# Altium schematic symbol library Transistors-Thyristors.SchLib: 9 symbols
Pins are listed as number, name and electrical type; pins without a type are passive.

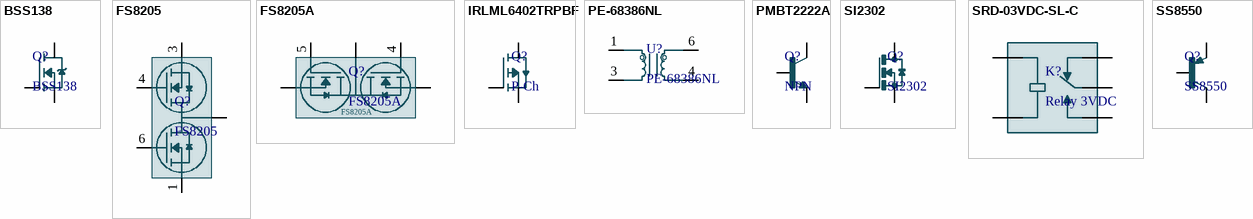
[diagram p0: symbols BSS138 to SS8550]

## BSS138
designator Q?
N-Channel 50 V 220mA (Ta) 350mW (Ta) Surface Mount SOT-23-3; Value: Transistor; MF: onsemi; SnapEDA_Link: https://www.snapeda.com/parts/BSS138/Onsemi/view-part/?ref=snap; Package: SOT-23-3 Motorola; MP: BSS138; Check_prices: https://www.snapeda.com/parts/BSS138/Onsemi/view-part/?ref=eda
footprint BSS138 (SOT95P240X111-3N)
pins: 1 G, 2 S, 3 D

## FS8205
designator Q?
Dual N-Channel Enhancement Mode Power MOSFET; MF: Fortune Semiconductor; SnapEDA_Link: https://www.snapeda.com/parts/FS8205/Fortune+Semiconductor/view-part/?ref=snap; Package: Package; Value: *; MP: FS8205; Check_prices: https://www.snapeda.com/parts/FS8205/Fortune+Semiconductor/view-part/?ref=eda
footprint FS8205 (SOT95P280X145-6N)
pins: 1 S1, 2 D12, 3 S2, 4 G2, 5 D12, 6 G1

## FS8205A
designator Q?
DUAL N-CH MOS 20V 3/3A TSSOP-8; MF: Fortune Semiconductor; SnapEDA_Link: https://www.snapeda.com/parts/FS8205A/Fortune+Semiconductor/view-part/?ref=snap; Package: Package; Value: *; MP: FS8205A; Check_prices: https://www.snapeda.com/parts/FS8205A/Fortune+Semiconductor/view-part/?ref=eda
footprint FS8205A (SOP65P640X120-8N)
pins: 1 D12, 2 S1, 3 S1, 4 G1, 5 G2, 6 S2, 7 S2, 8 D12

## IRLML6402TRPBF
designator Q?, comment P-Ch
P-Channel 20 V 3.7A (Ta) 1.3W /SOT-23; MF: Infineon; MP: IRLML6402TRPBF; SnapEDA_Link: https://www.snapeda.com/parts/IRLML6402TRPBF/Infineon/view-part/?ref=snap; Package: SOT-23-3 ON Semiconductor; Value: *; Check_prices: https://www.snapeda.com/parts/IRLML6402TRPBF/Infineon/view-part/?ref=eda
footprint IRLML6402TRPBF (SOT95P237X112-3N)
pins: 1 G, 2 S, 3 D

## PE-68386NL
designator U?
785µH Pulse Transformer 1:1 Surface Mount; MF: Pulse Electronics; Value: *; Availability: Unavailable; Package: Pulse Electronics; Price: None; SnapEDA_Link: https://www.snapeda.com/parts/PE-68386NL/Pulse%20Electronics%20Power/view-part/455487/?ref=snap; MP: PE-68386NL
pins: 1, 3, 4, 6

## PMBT2222A
designator Q?, comment NPN
Bipolar (BJT) Transistor NPN 40V 600mA 300MHz 250mW Surface Mount SOT23: TO-236AB; MF: Infineon; MP: PMBT2222A; Price: None; Purchase-URL: https://pricing.snapeda.com/search/part/PMBT2222A/?ref=eda; Package: SOT-23-3 Infineon; Check_prices: https://www.snapeda.com/parts/PMBT2222A/Infineon/view-part/?ref=eda; Availability: In Stock; Value: Transistor; SnapEDA_Link: https://www.snapeda.com/parts/PMBT2222A/Infineon/view-part/?ref=snap
footprint PMBT2222A (TO-236AB)
pins: 1 B, 2 E, 3 C

## SI2302
designator Q?
N-Channel 20 V 2.6A (Ta) 710mW (Ta) Surface Mount SOT-23-3 (TO-236); Value: Transistor; MF: Vishay Siliconix; Price: None; Availability: In Stock; Package: SOT-23-3 Vishay Siliconix; MP: SI2302; SnapEDA_Link: https://www.snapeda.com/parts/SI2302/Vishay+Siliconix/view-part/?ref=snap; Purchase-URL: https://pricing.snapeda.com/search/part/SI2302/?ref=eda; Check_prices: https://www.snapeda.com/parts/SI2302/Vishay+Siliconix/view-part/?ref=eda
footprint SI2302 (SOT23)
pins: 1 G, 2 S, 3 D

## SRD-03VDC-SL-C
designator K?, comment Relay 3VDC
Relays General Purpose Non Latching 3VDC SPDT 10A (250VAC) Max 5PIN; MF: Songle Relay; MP: SRD-03VDC-SL-C; SnapEDA_Link: https://www.snapeda.com/parts/SRD-03VDC-SL-C/Songle+Relay/view-part/?ref=snap; Package: NON STANDARD-5 Songle Relay; Value: *; Check_prices: https://www.snapeda.com/parts/SRD-03VDC-SL-C/Songle+Relay/view-part/?ref=eda
footprint RELAY_SRD-03VDC-SL-C
pins: COIL1, COIL2, COM, NC, NO

## SS8550
designator Q?
Bipolar (BJT) Transistor PNP 25 V 1.5 A 100MHz 300 mW Surface Mount SOT-23; MF: MDD; SnapEDA_Link: https://www.snapeda.com/parts/SS8550/MDD/view-part/?ref=snap; Package: SOT-23-3 MDD; Value: Transistor; MP: SS8550; Check_prices: https://www.snapeda.com/parts/SS8550/MDD/view-part/?ref=eda
footprint SS8550 (SOT95P252X140-3N)
pins: 1 B, 2 E, 3 C